# Altium schematic symbol library capacitor_mlcc.SchLib: 6 symbols
Pins are listed as number, name and electrical type; pins without a type are passive.

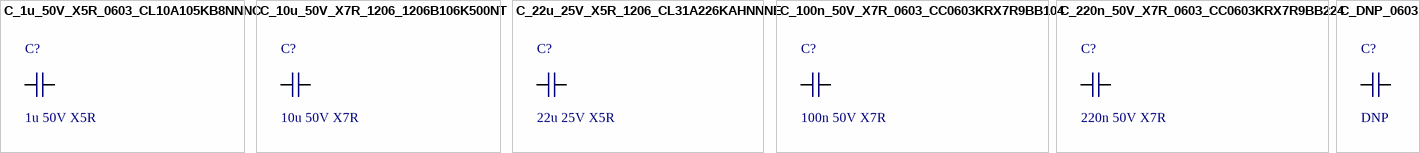
[diagram p0: symbols C_1u_50V_X5R_0603_CL10A105KB8NNNC to C_DNP_0603]

## C_1u_50V_X5R_0603_CL10A105KB8NNNC
designator C?, comment 1u 50V X5R
CVCC: 1 uF 50 V X5R 0603; Manufacturer: Samsung; MPN: CL10A105KB8NNNC; Value: 1u 50V X5R; LCSC: C15849; JLCPCB Type: Basic; Datasheet: CL10A105KB8NNNC_C15849.pdf
footprint CAPC1608_0603
pins: 1, 2

## C_10u_50V_X7R_1206_1206B106K500NT
designator C?, comment 10u 50V X7R
CIN: 10 uF 50 V X7R 10% 1206; Manufacturer: FH; MPN: 1206B106K500NT; Value: 10u 50V X7R; LCSC: C303950; JLCPCB Type: Extended; Datasheet: 1206B106K500NT_C303950.pdf
footprint CAPC3216_1206
pins: 1, 2

## C_22u_25V_X5R_1206_CL31A226KAHNNNE
designator C?, comment 22u 25V X5R
COUT: 22 uF 25 V X5R 10% 1206; Manufacturer: Samsung; MPN: CL31A226KAHNNNE; Value: 22u 25V X5R; LCSC: C12891; JLCPCB Type: Basic; Datasheet: CL31A226KAHNNNE_C12891.pdf
footprint CAPC3216_1206
pins: 1, 2

## C_100n_50V_X7R_0603_CC0603KRX7R9BB104
designator C?, comment 100n 50V X7R
CBOOT / HF bypass: 100 nF 50 V X7R 0603; Manufacturer: YAGEO; MPN: CC0603KRX7R9BB104; Value: 100n 50V X7R; LCSC: C14663; JLCPCB Type: Basic; Datasheet: CC0603KRX7R9BB104_C14663.pdf
footprint CAPC1608_0603
pins: 1, 2

## C_220n_50V_X7R_0603_CC0603KRX7R9BB224
designator C?, comment 220n 50V X7R
CHF: 220 nF 50 V X7R 0603; Manufacturer: YAGEO; MPN: CC0603KRX7R9BB224; Value: 220n 50V X7R; LCSC: C107083; JLCPCB Type: Extended; Datasheet: CC0603KRX7R9BB224_C107083.pdf
footprint CAPC1608_0603
pins: 1, 2

## C_DNP_0603
designator C?, comment DNP
CFF footprint only, do not populate (lmr33630 Table 9-2: CFF open); Value: DNP; Manufacturer: -; MPN: -; LCSC: -; JLCPCB Type: -; Datasheet: -
footprint CAPC1608_0603
pins: 1, 2